# Altium schematic symbol library RF_FILTER.SchLib: 34 symbols
Pins are listed as number, name and electrical type; pins without a type are passive.

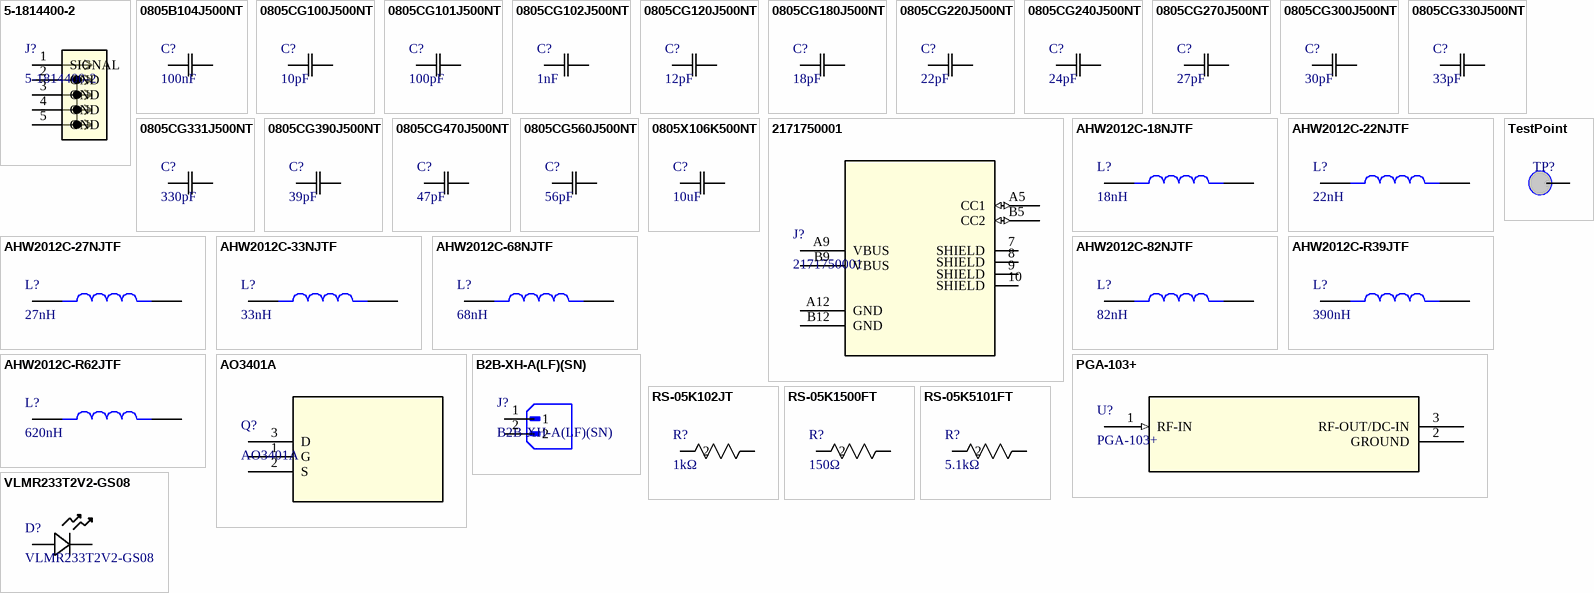
[diagram p0: symbols 5-1814400-2 to VLMR233T2V2-GS08]

## 5-1814400-2
designator J?
CONN RCPT SMA TH; Manufacturer: TE Connectivity; Manufacturer Part Number: 5-1814400-2; Value: SMA; LCSC Part #: C3174972
footprint COAX4GND_5-1814400-2_TEC
pins: 1 SIGNAL, 2 GND, 3 GND, 4 GND, 5 GND

## 0805B104J500NT
designator C?, comment 100nF
CAP CER 100nF 50V X7R 0805; Manufacturer: FH (Guangdong Fenghua Advanced Tech); Manufacturer Part Number: 0805B104J500NT; Value: 100nF; LCSC Part #: C29926
footprint CAPC220145_88N_KEM
pins: 1, 2

## 0805CG100J500NT
designator C?, comment 10pF
CAP CER 10pF 50V C0G 0805; Manufacturer: FH (Guangdong Fenghua Advanced Tech); Manufacturer Part Number: 0805CG100J500NT; Value: 10pF; LCSC Part #: C157608
footprint CAPC220145_88N_KEM
pins: 1, 2

## 0805CG101J500NT
designator C?, comment 100pF
CAP CER 100pF 50V C0G 0805; Manufacturer: FH (Guangdong Fenghua Advanced Tech); Manufacturer Part Number: 0805CG101J500NT; Value: 100pF; LCSC Part #: C82028
footprint CAPC220145_88N_KEM
pins: 1, 2

## 0805CG102J500NT
designator C?, comment 1nF
CAP CER 1nF 50V C0G 0805; Manufacturer: FH (Guangdong Fenghua Advanced Tech); Manufacturer Part Number: 0805CG102J500NT; Value: 1nF; LCSC Part #: C29925
footprint CAPC220145_88N_KEM
pins: 1, 2

## 0805CG120J500NT
designator C?, comment 12pF
CAP CER 12pF 50V C0G 0805; Manufacturer: FH (Guangdong Fenghua Advanced Tech); Manufacturer Part Number: 0805CG120J500NT; Value: 12pF; LCSC Part #: C1792
footprint CAPC220145_88N_KEM
pins: 1, 2

## 0805CG180J500NT
designator C?, comment 18pF
CAP CER 18pF 50V C0G 0805; Manufacturer: FH (Guangdong Fenghua Advanced Tech); Manufacturer Part Number: 0805CG180J500NT; Value: 18pF; LCSC Part #: C1797
footprint CAPC220145_88N_KEM
pins: 1, 2

## 0805CG220J500NT
designator C?, comment 22pF
CAP CER 22pF 50V C0G 0805; Manufacturer: FH (Guangdong Fenghua Advanced Tech); Manufacturer Part Number: 0805CG220J500NT; Value: 22pF; LCSC Part #: C24658
footprint CAPC220145_88N_KEM
pins: 1, 2

## 0805CG240J500NT
designator C?, comment 24pF
CAP CER 24pF 50V C0G 0805; Manufacturer: FH (Guangdong Fenghua Advanced Tech); Manufacturer Part Number: 0805CG240J500NT; Value: 24pF; LCSC Part #: C1806
footprint CAPC220145_88N_KEM
pins: 1, 2

## 0805CG270J500NT
designator C?, comment 27pF
CAP CER 27pF 50V C0G 0805; Manufacturer: FH (Guangdong Fenghua Advanced Tech); Manufacturer Part Number: 0805CG270J500NT; Value: 27pF; LCSC Part #: C1808
footprint CAPC220145_88N_KEM
pins: 1, 2

## 0805CG300J500NT
designator C?, comment 30pF
CAP CER 30pF 50V C0G 0805; Manufacturer: FH (Guangdong Fenghua Advanced Tech); Manufacturer Part Number: 0805CG300J500NT; Value: 30pF; LCSC Part #: C43094
footprint CAPC220145_88N_KEM
pins: 1, 2

## 0805CG330J500NT
designator C?, comment 33pF
CAP CER 33pF 50V C0G 0805; Manufacturer: FH (Guangdong Fenghua Advanced Tech); Manufacturer Part Number: 0805CG330J500NT; Value: 33pF; LCSC Part #: C157687
footprint CAPC220145_88N_KEM
pins: 1, 2

## 0805CG331J500NT
designator C?, comment 330pF
CAP CER 330pF 50V C0G 0805; Manufacturer: FH (Guangdong Fenghua Advanced Tech); Manufacturer Part Number: 0805CG331J500NT; Value: 330pF; LCSC Part #: C1815
footprint CAPC220145_88N_KEM
pins: 1, 2

## 0805CG390J500NT
designator C?, comment 39pF
CAP CER 39pF 50V C0G 0805; Manufacturer: FH (Guangdong Fenghua Advanced Tech); Manufacturer Part Number: 0805CG390J500NT; Value: 39pF; LCSC Part #: C1817
footprint CAPC220145_88N_KEM
pins: 1, 2

## 0805CG470J500NT
designator C?, comment 47pF
CAP CER 47pF 50V C0G 0805; Manufacturer: FH (Guangdong Fenghua Advanced Tech); Manufacturer Part Number: 0805CG470J500NT; Value: 47pF; LCSC Part #: C24659
footprint CAPC220145_88N_KEM
pins: 1, 2

## 0805CG560J500NT
designator C?, comment 56pF
CAP CER 56pF 50V C0G 0805; Manufacturer: FH (Guangdong Fenghua Advanced Tech); Manufacturer Part Number: 0805CG560J500NT; Value: 56pF; LCSC Part #: C1828
footprint CAPC220145_88N_KEM
pins: 1, 2

## 0805X106K500NT
designator C?, comment 10uF
CAP CER 10uF 50V X5R 0805; Manufacturer: FH (Guangdong Fenghua Advanced Tech); Manufacturer Part Number: 0805X106K500NT; Value: 10uF; LCSC Part #: C6117579
footprint CAPC220145_88N_KEM
pins: 1, 2

## 2171750001
designator J?
TYPE C 6 PIN TOP MOUNT SMT; Manufacturer: Molex; Value: USB-C; Manufacturer Part Number: 2171750001; LCSC Part #: C3197922
footprint 2171750001_MOL
pins: 7 SHIELD, 8 SHIELD, 9 SHIELD, 10 SHIELD, A5 CC1 (io), A9 VBUS (power), A12 GND (power), B5 CC2 (io), B9 VBUS (power), B12 GND (power)

## AHW2012C-18NJTF
designator L?, comment 18nH
FIXED IND 18nH 600mA 0.2Ω 0805; Manufacturer: APV; Manufacturer Part Number: AHW2012C-18NJTF; Value: 18nH; LCSC Part #: C6808029
footprint IND_AISC-0805-R082J-T
pins: 1, 2

## AHW2012C-22NJTF
designator L?, comment 22nH
FIXED IND 22nH 500mA 0.22Ω 0805; Manufacturer: APV; Manufacturer Part Number: AHW2012C-22NJTF; Value: 22nH; LCSC Part #: C6808033
footprint IND_AISC-0805-R082J-T
pins: 1, 2

## AHW2012C-27NJTF
designator L?, comment 27nH
FIXED IND 27nH 500mA 0.25Ω 0805; Manufacturer: APV; Manufacturer Part Number: AHW2012C-27NJTF; Value: 27nH; LCSC Part #: C7427068
footprint IND_AISC-0805-R082J-T
pins: 1, 2

## AHW2012C-33NJTF
designator L?, comment 33nH
FIXED IND 33nH 500mA 0.27Ω 0805; Manufacturer: APV; Manufacturer Part Number: AHW2012C-33NJTF; Value: 33nH; LCSC Part #: C6808037
footprint IND_AISC-0805-R082J-T
pins: 1, 2

## AHW2012C-68NJTF
designator L?, comment 68nH
FIXED IND 68nH 500mA 0.38Ω 0805; Manufacturer: APV; Manufacturer Part Number: AHW2012C-68NJTF; Value: 68nH; LCSC Part #: C6808042
footprint IND_AISC-0805-R082J-T
pins: 1, 2

## AHW2012C-82NJTF
designator L?, comment 82nH
FIXED IND 82nH 400mA 0.42Ω 0805; Manufacturer: APV; Manufacturer Part Number: AHW2012C-82NJTF; Value: 82nH; LCSC Part #: C6364713
footprint IND_AISC-0805-R082J-T
pins: 1, 2

## AHW2012C-R39JTF
designator L?, comment 390nH
FIXED IND 0.39uH 290mA 1.5Ω 0805; Manufacturer: APV; Manufacturer Part Number: AHW2012C-R39JTF; Value: 390nH; LCSC Part #: C6808052
footprint IND_AISC-0805-R082J-T
pins: 1, 2

## AHW2012C-R62JTF
designator L?, comment 620nH
FIXED IND 620nH 210mA 2.2Ω 0805; Manufacturer: APV; Manufacturer Part Number: AHW2012C-R62JTF; Value: 620nH; LCSC Part #: C19633939
footprint IND_AISC-0805-R082J-T
pins: 1, 2

## AO3401A
designator Q?
MOSFET P-CH 30V 4A SOT-23; Manufacturer: Alpha & Omega Semiconductor; Manufacturer Part Number: AO3401A; Value: AO3401A; LCSC Part #: C15127
footprint SOT-23-3L_AOS
pins: 1 G, 2 S, 3 D

## B2B-XH-A(LF)(SN)
designator J?
CONN HEADER TH 2POS 2.5mm; Manufacturer: JST; Value: JST-XH 2P; Manufacturer Part Number: B2B-XH-A(LF)(SN); LCSC Part #: C158012
footprint JST_B2B-XH-A
pins: 1, 2

## PGA-103+
designator U?
RF Amplifier IC CATV, Cellular, DBS, MMDS, PCS, WLAN, Wireless LAN 50MHz ~ 4GHz SOT-89; Manufacturer: Mini-Circuits; Manufacturer Part Number: PGA-103+; LCSC Part #: C3008207; Value: PGA-103+
footprint DF782_MNC-M
pins: 1 RF-IN (in), 2 GROUND (power), 3 RF-OUT/DC-IN

## RS-05K102JT
designator R?, comment 1kΩ
RES 1kΩ ±5% 125mW 0805; Manufacturer: FH (Guangdong Fenghua Advanced Tech); Manufacturer Part Number: RS-05K102JT; Value: 1kΩ; LCSC Part #: C115302
footprint RC0805N_YAG
pins: 1, 2

## RS-05K1500FT
designator R?, comment 150Ω
RES 150Ω ±1% 125mW 0805; Manufacturer: FH (Guangdong Fenghua Advanced Tech); Manufacturer Part Number: RS-05K1500FT; Value: 150Ω; LCSC Part #: C304819
footprint RC0805N_YAG
pins: 1, 2

## RS-05K5101FT
designator R?, comment 5.1kΩ
RES 5.1kΩ ±1% 125mW 0805; Manufacturer: FH (Guangdong Fenghua Advanced Tech); Manufacturer Part Number: RS-05K5101FT; Value: 5.1kΩ; LCSC Part #: C118848
footprint RC0805N_YAG
pins: 1, 2

## TestPoint
designator TP?  (value not drawn)  (no BOM)
Test point, 1.0 mm plated hole; LCSC Part #: N/A; Manufacturer Part Number: N/A; Manufacturer: N/A; Value: N/A
footprint TP_PTH_1.0
pins: 1

## VLMR233T2V2-GS08
designator D?
LED RED 0805 SMD; Manufacturer: Vishay; Value: Red LED; Manufacturer Part Number: VLMR233T2V2-GS08; LCSC Part #: C511093
footprint LED_VISHAY_VLMX233_VIS
pins: 1, 2